# Altium schematic symbol library RES,16k2,1%,0.05W,0201.Schlib: 1 symbol
Pins are listed as number, name and electrical type; pins without a type are passive.

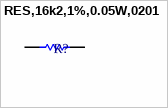
[diagram p0: symbol RES,16k2,1%,0.05W,0201]

## RES,16k2,1%,0.05W,0201
designator R?
pins: 1, 2